# EAGLE library part MAX17222ELT+T (library MAX17222ELT+T)
Boost Switching Regulator IC Positive Adjustable 1.8V 1 Output 500mA (Switch) 6-WDFN Source: Datasheet <https://www.analog.com/MAX17222/datasheet>
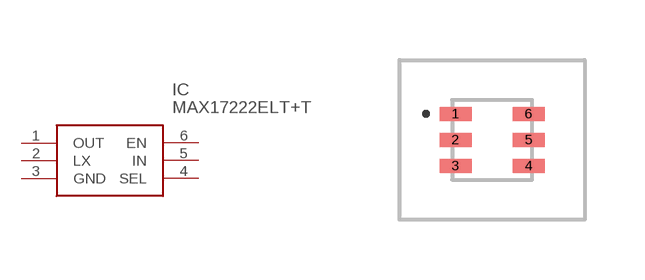
[diagram p0: symbol with the pads of MAX17222ELTT; footprint MAX17222ELTT]

Designator prefix IC

## MAX17222ELT+T (Description: Boost Switching Regulator IC Positive Adjustable 1.8V 1 Output 500mA (Switch) 6-WDFN; Height: 0.8mm; Manufacturer_Name: Analog Devices; Manufacturer_Part_Number: MAX17222ELT+T; Mouser_Part_Number: 700-MAX17222ELT+T; Mouser_Price-Stock: https://www.mouser.co.uk/ProductDetail/Analog-Devices-Maxim-Integrated/MAX17222ELT%2bT?qs=u4fy%2FsgLU9PcvsZj65z6yw%3D%3D)  [MAX17222ELTT]
1  OUT
2  LX
3  GND
4  SEL
5  IN
6  EN

## Footprint MAX17222ELTT (pad centres in mm)
MAX17222ELT+T-1
smd 0.8 x 0.35: 1 -0.915,0.65; 2 -0.915,0; 3 -0.915,-0.65; 4 0.915,-0.65; 5 0.915,0; 6 0.915,0.65